# Altium footprint library FA-T220-38E.PcbLib: 1 footprints
Each footprint in its own frame and in the unit in brackets; x right, y up, seen from the top. Pads: shape width x height; smd on the part's side, far side on the other; paste and mask are expansions set on the pad; w line width, h text height; cw(c..) or ccw(c..) is an arc to the next point about the centre after c.
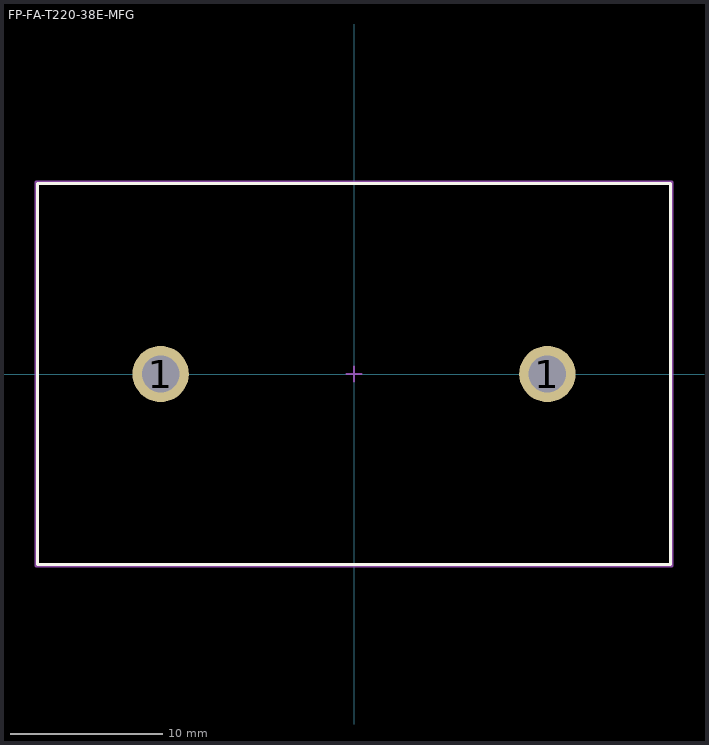
[diagram p0: the footprint, top view; thin cyan lines are the x and y axes]

## FP-FA-T220-38E-MFG [mm]
pads (2):
  round 3.7 hole 2.45 paste-2539.97 mask+0: 1(-12.7,0) 1(12.7,0)
Top Overlay:
  lines w0.2: -20.8,-12.5 -20.8,12.5 20.8,12.5 20.8,-12.5 -20.8,-12.5
Top Assembly:
  lines w0.2: -20.9,-12.6 -20.9,12.6 20.9,12.6 20.9,-12.6 -20.9,-12.6
  text ".Designator" at 0,0 h1
Top 3D Body:
  lines w0.2: -20.8,-12.5 -20.8,12.5 20.8,12.5 20.8,-12.5 -20.8,-12.5
Top Courtyard:
  lines w0.2: -20.9,-12.6 -20.9,12.6 20.9,12.6 20.9,-12.6 -20.9,-12.6
Top Component Center:
  lines w0.1: -0.5,0 0.5,0 ; 0,-0.5 0,0.5
3D body "UNK_Ohmite_FA-T220-38E_eec.STEP": height 0.25, standoff 0, extent -20.9,-12.6 20.9,12.6